# Altium footprint library Footprint-Lib-PhilsLab.PcbLib: 544 footprints (part 20 of 34)
Each footprint in its own frame and in the unit in brackets; x right, y up, seen from the top. Pads: shape width x height; smd on the part's side, far side on the other; paste and mask are expansions set on the pad; w line width, h text height; cw(c..) or ccw(c..) is an arc to the next point about the centre after c.
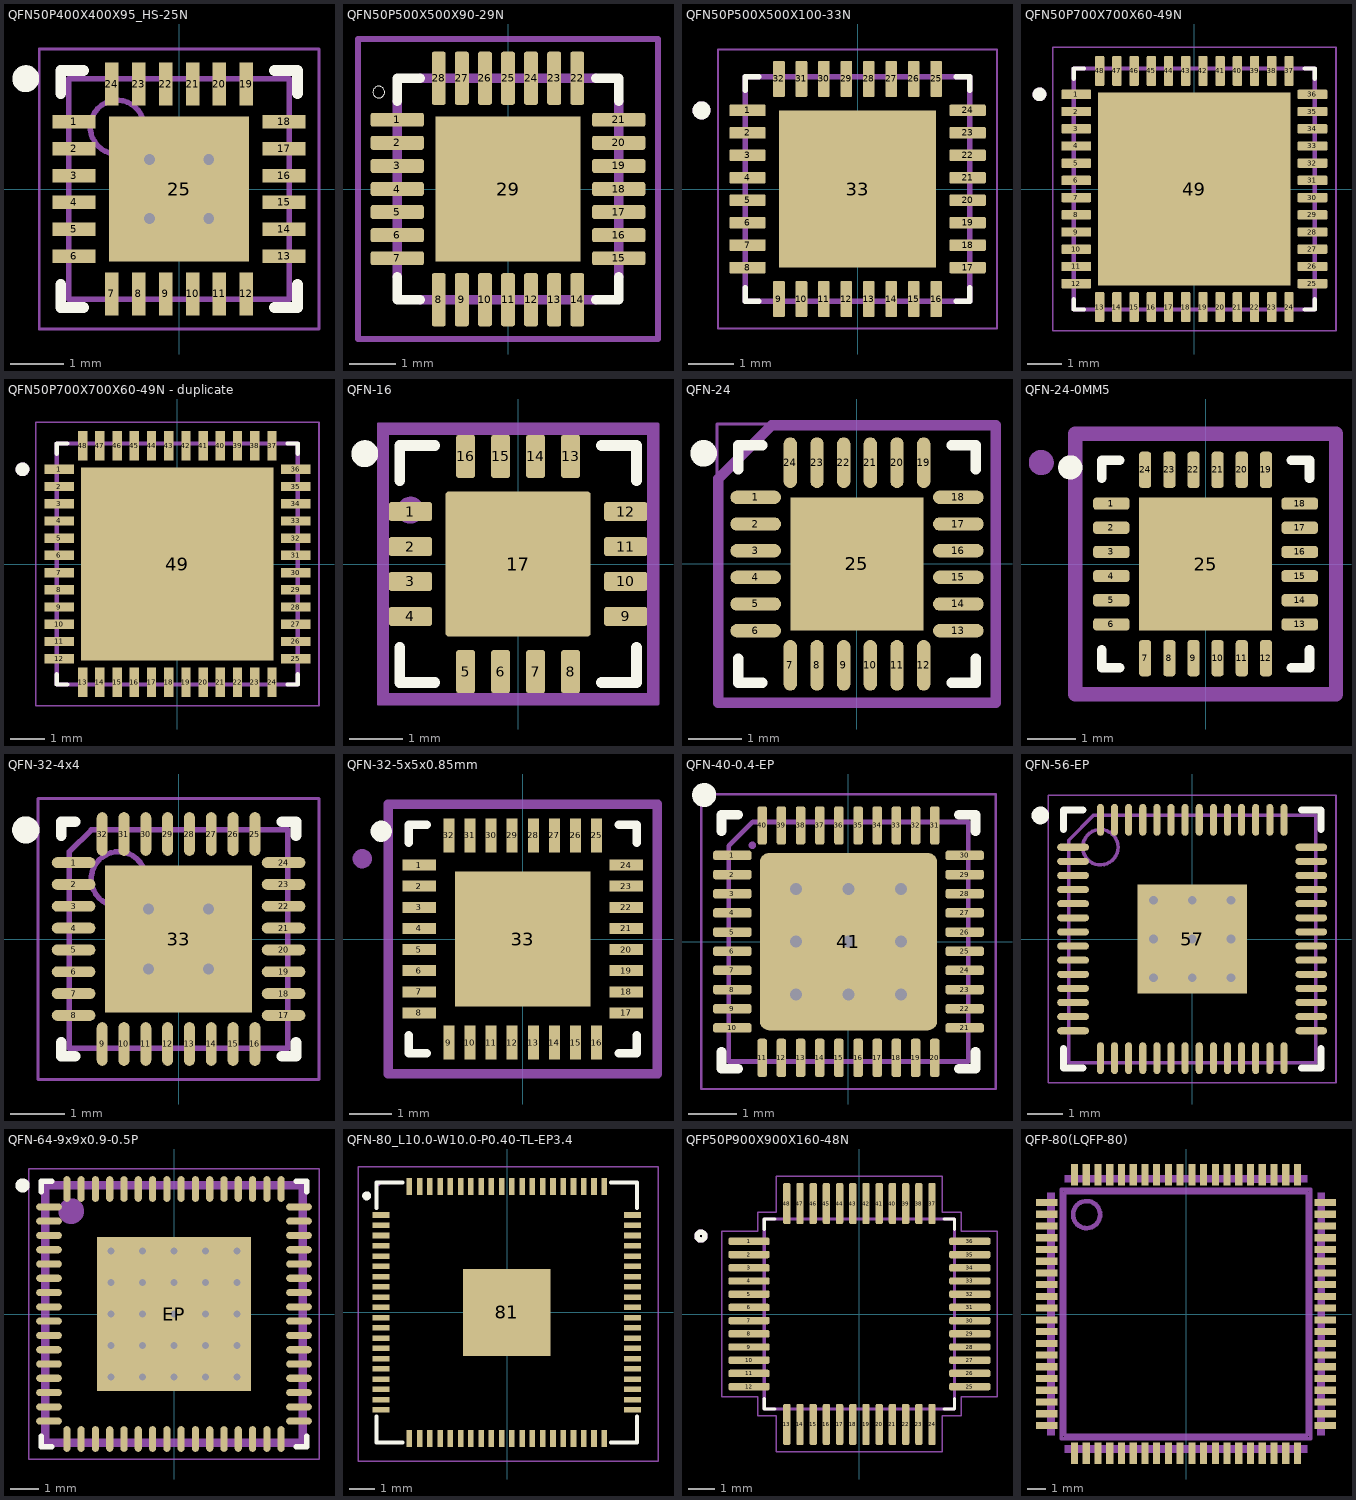
[diagram p19: the footprints below, top view; thin cyan lines are the x and y axes]

## QFN50P400X400X95_HS-25N [mm] "QFN, 24-Leads, Body 4.00x4.00mm, Pitch 0.50mm, Thermal Pad 2.60x2.70mm, IPC Medium Density"
height 0.95
pads (25):
  rect 0.8x0.25 smd mask+0.05: 1(-1.95,1.25) 2(-1.95,0.75) 3(-1.95,0.25) 4(-1.95,-0.25) 5(-1.95,-0.75) 6(-1.95,-1.25) 13(1.95,-1.25) 14(1.95,-0.75) 15(1.95,-0.25) 16(1.95,0.25) 17(1.95,0.75) 18(1.95,1.25)
  rect 0.25x0.8 smd mask+0.05: 7(-1.25,-1.95) 8(-0.75,-1.95) 9(-0.25,-1.95) 10(0.25,-1.95) 11(0.75,-1.95) 12(1.25,-1.95) 19(1.25,1.95) 20(0.75,1.95) 21(0.25,1.95) 22(-0.25,1.95) 23(-0.75,1.95) 24(-1.25,1.95)
  rect 2.6x2.7 smd mask+0.05: 25(0,0)
via 0.55,-0.55 diameter 0.5 hole 0.2
via -0.55,-0.55 diameter 0.5 hole 0.2
via 0.55,0.55 diameter 0.5 hole 0.2
via -0.55,0.55 diameter 0.5 hole 0.2
Top Overlay:
  circle w0.25: c-2.85,2.05 r0.125
  lines w0.2: -2.2,-1.775 -2.2,-2.2 -1.775,-2.2 ; -2.2,1.775 -2.2,2.2 -1.775,2.2 ; 1.775,-2.2 2.2,-2.2 2.2,-1.775 ; 1.775,2.2 2.2,2.2 2.2,1.775
Mechanical 13:
  circle w0.1: c-1.15,1.15 r0.5
  lines w0.1: -2.05,-2.05 2.05,-2.05 2.05,2.05 -2.05,2.05 -2.05,-2.05
  text "'.Designator'" at -5.84,-0.925 h1
Mechanical 15:
  lines w0.05: -2.6,-2.6 2.6,-2.6 2.6,2.6 -2.6,2.6 -2.6,-2.6
  lines w0.1: -0.5,0 0.5,0 ; 0,-0.5 0,0.5
3D body "ICM-20689.STEP": height 0.94, standoff -0.01, extent -2,-2 2,2

## QFN50P500X500X90-29N [mm]
pads (29):
  rrect30% 1.15x0.3 smd mask+0: 1(-2.4,1.5) 2(-2.4,1) 3(-2.4,0.5) 4(-2.4,0) 5(-2.4,-0.5) 6(-2.4,-1) 7(-2.4,-1.5) 15(2.4,-1.5) 16(2.4,-1) 17(2.4,-0.5) 18(2.4,0) 19(2.4,0.5) 20(2.4,1) 21(2.4,1.5)
  rrect30% 0.3x1.15 smd mask+0: 8(-1.5,-2.4) 9(-1,-2.4) 10(-0.5,-2.4) 11(0,-2.4) 12(0.5,-2.4) 13(1,-2.4) 14(1.5,-2.4) 22(1.5,2.4) 23(1,2.4) 24(0.5,2.4) 25(0,2.4) 26(-0.5,2.4) 27(-1,2.4) 28(-1.5,2.4)
  rect 3.15x3.15 smd paste-3: 29(0,0)
Top Overlay:
  circle w0: c-2.8,2.1 r0.127
  lines w0.203: -2.398,-1.902 -2.398,-2.398 -1.902,-2.398 ; -2.398,1.902 -2.398,2.398 -1.902,2.398 ; 1.902,-2.398 2.398,-2.398 2.398,-1.902 ; 1.902,2.398 2.398,2.398 2.398,1.902
Top Paste:
  region: 1,-1.002 -1.002,-1.002 -1.002,1 1,1
Top Solder:
  region: -1.775,-1.703 -3.03,-1.703 -3.03,-1.3 -1.775,-1.3
  region: -1.775,-1.201 -3.028,-1.201 -3.028,-0.8 -1.775,-0.8
  region: -1.775,-0.701 -3.029,-0.701 -3.029,-0.3 -1.775,-0.3
  region: -1.775,-0.2 -3.026,-0.2 -3.026,0.2 -1.775,0.2
  region: -1.775,0.3 -3.027,0.3 -3.027,0.7 -1.775,0.7
  region: -1.775,0.801 -3.028,0.801 -3.028,1.2 -1.775,1.2
  region: -1.775,1.3 -3.025,1.3 -3.025,1.7 -1.775,1.7
  region: 2.125,-2.605 0.877,-2.605 0.877,-2.2 2.125,-2.2
  region: 1.625,-2.602 0.375,-2.602 0.375,-2.2 1.625,-2.2
  region: 1.125,-2.602 -0.125,-2.602 -0.125,-2.2 1.125,-2.2
  region: 0.625,-2.603 -0.626,-2.603 -0.626,-2.2 0.625,-2.2
  region: 0.125,-2.605 -1.127,-2.605 -1.127,-2.2 0.125,-2.2
  region: -0.375,-2.605 -1.628,-2.605 -1.628,-2.2 -0.375,-2.2
  region: -0.875,-2.602 -2.126,-2.602 -2.126,-2.2 -0.875,-2.2
  region: 3.025,1.301 1.776,1.301 1.776,1.7 3.025,1.7
  region: 3.025,0.801 1.778,0.801 1.778,1.2 3.025,1.2
  region: 3.025,0.3 1.776,0.3 1.776,0.7 3.025,0.7
  region: 3.025,-0.2 1.777,-0.2 1.777,0.2 3.025,0.2
  region: 3.025,-0.701 1.778,-0.701 1.778,-0.3 3.025,-0.3
  region: 3.025,-1.2 1.775,-1.2 1.775,-0.8 3.025,-0.8
  region: 3.025,-1.7 1.775,-1.7 1.775,-1.3 3.025,-1.3
  region: 2.125,2.2 0.875,2.2 0.875,2.6 2.125,2.6
  region: 1.625,2.202 0.375,2.202 0.375,2.6 1.625,2.6
  region: 1.125,2.204 -0.125,2.204 -0.125,2.6 1.125,2.6
  region: 0.625,2.201 -0.625,2.201 -0.625,2.6 0.625,2.6
  region: 0.125,2.201 -1.125,2.201 -1.125,2.6 0.125,2.6
  region: -0.375,2.202 -1.626,2.202 -1.626,2.6 -0.375,2.6
  region: -0.875,2.201 -2.126,2.201 -2.126,2.6 -0.875,2.6
Mechanical 13:
  lines w0.203: -2.4,-1.9 -2.4,1.9 ; -1.9,-2.4 1.9,-2.4 ; -1.9,2.4 1.9,2.4 ; 2.4,-1.9 2.4,1.9
Mechanical 15:
  lines w0.127: -3.25,-3.25 3.25,-3.25 3.25,3.25 -3.25,3.25 -3.25,-3.25

## QFN50P500X500X100-33N [mm]
pads (33):
  rrect25% 0.81x0.26 smd: 1(-2.45,1.75) 2(-2.45,1.25) 3(-2.45,0.75) 4(-2.45,0.25) 5(-2.45,-0.25) 6(-2.45,-0.75) 7(-2.45,-1.25) 8(-2.45,-1.75) 17(2.45,-1.75) 18(2.45,-1.25) 19(2.45,-0.75) 20(2.45,-0.25) 21(2.45,0.25) 22(2.45,0.75) 23(2.45,1.25) 24(2.45,1.75)
  rrect25% 0.26x0.81 smd: 9(-1.75,-2.45) 10(-1.25,-2.45) 11(-0.75,-2.45) 12(-0.25,-2.45) 13(0.25,-2.45) 14(0.75,-2.45) 15(1.25,-2.45) 16(1.75,-2.45) 25(1.75,2.45) 26(1.25,2.45) 27(0.75,2.45) 28(0.25,2.45) 29(-0.25,2.45) 30(-0.75,2.45) 31(-1.25,2.45) 32(-1.75,2.45)
  rect 3.5x3.5 smd paste-0.64: 33(0,0)
Top Overlay:
  circle w0.2: c-3.475,1.75 r0.1
  lines w0.127: -2.5,-2.2 -2.5,-2.5 -2.2,-2.5 ; -2.5,2.2 -2.5,2.5 -2.2,2.5 ; 2.2,-2.5 2.5,-2.5 2.5,-2.2 ; 2.2,2.5 2.5,2.5 2.5,2.2
Mechanical 13:
  circle w0.2: c-3.475,1.75 r0.1
  lines w0.127: -2.5,-2.5 -2.5,2.5 2.5,2.5 2.5,-2.5 -2.5,-2.5
Mechanical 15:
  lines w0.05: -3.105,-3.105 -3.105,3.105 3.105,3.105 3.105,-3.105 -3.105,-3.105
3D body "step_temp.STEP": height 1, standoff 0, extent -2.5,-2.5 2.5,2.5

## QFN50P700X700X60-49N [mm]
pads (49):
  rrect25% 0.87x0.27 smd: 1(-3.43,2.75) 2(-3.43,2.25) 3(-3.43,1.75) 4(-3.43,1.25) 5(-3.43,0.75) 6(-3.43,0.25) 7(-3.43,-0.25) 8(-3.43,-0.75) 9(-3.43,-1.25) 10(-3.43,-1.75) 11(-3.43,-2.25) 12(-3.43,-2.75) 25(3.43,-2.75) 26(3.43,-2.25) 27(3.43,-1.75) 28(3.43,-1.25) 29(3.43,-0.75) 30(3.43,-0.25) 31(3.43,0.25) 32(3.43,0.75) 33(3.43,1.25) 34(3.43,1.75) 35(3.43,2.25) 36(3.43,2.75)
  rrect25% 0.27x0.87 smd: 13(-2.75,-3.43) 14(-2.25,-3.43) 15(-1.75,-3.43) 16(-1.25,-3.43) 17(-0.75,-3.43) 18(-0.25,-3.43) 19(0.25,-3.43) 20(0.75,-3.43) 21(1.25,-3.43) 22(1.75,-3.43) 23(2.25,-3.43) 24(2.75,-3.43) 37(2.75,3.43) 38(2.25,3.43) 39(1.75,3.43) 40(1.25,3.43) 41(0.75,3.43) 42(0.25,3.43) 43(-0.25,3.43) 44(-0.75,3.43) 45(-1.25,3.43) 46(-1.75,3.43) 47(-2.25,3.43) 48(-2.75,3.43)
  rect 5.6x5.6 smd paste-4: 49(0,0)
Top Overlay:
  circle w0.2: c-4.5,2.75 r0.1
  lines w0.127: -3.5,-3.205 -3.5,-3.5 -3.205,-3.5 ; -3.5,3.205 -3.5,3.5 -3.205,3.5 ; 3.205,-3.5 3.5,-3.5 3.5,-3.205 ; 3.205,3.5 3.5,3.5 3.5,3.205
Top Paste:
  region: -0.51,0.51 -2.29,0.51 -2.29,2.29 -0.51,2.29
  region: 2.29,0.51 0.51,0.51 0.51,2.29 2.29,2.29
  region: -0.51,-2.29 -2.29,-2.29 -2.29,-0.51 -0.51,-0.51
  region: 2.29,-2.29 0.51,-2.29 0.51,-0.51 2.29,-0.51
Mechanical 13:
  circle w0.2: c-4.5,2.75 r0.1
  lines w0.127: -3.5,-3.5 3.5,-3.5 3.5,3.5 -3.5,3.5 -3.5,-3.5
Mechanical 15:
  lines w0.05: -4.115,-4.115 4.115,-4.115 4.115,4.115 -4.115,4.115 -4.115,-4.115

## QFN50P700X700X60-49N - duplicate [mm]
height 0.6
pads (49):
  rect 0.86x0.27 smd mask+0.05: 1(-3.435,2.75) 2(-3.435,2.25) 3(-3.435,1.75) 4(-3.435,1.25) 5(-3.435,0.75) 6(-3.435,0.25) 7(-3.435,-0.25) 8(-3.435,-0.75) 9(-3.435,-1.25) 10(-3.435,-1.75) 11(-3.435,-2.25) 12(-3.435,-2.75) 25(3.435,-2.75) 26(3.435,-2.25) 27(3.435,-1.75) 28(3.435,-1.25) 29(3.435,-0.75) 30(3.435,-0.25) 31(3.435,0.25) 32(3.435,0.75) 33(3.435,1.25) 34(3.435,1.75) 35(3.435,2.25) 36(3.435,2.75)
  rect 0.27x0.86 smd mask+0.05: 13(-2.75,-3.435) 14(-2.25,-3.435) 15(-1.75,-3.435) 16(-1.25,-3.435) 17(-0.75,-3.435) 18(-0.25,-3.435) 19(0.25,-3.435) 20(0.75,-3.435) 21(1.25,-3.435) 22(1.75,-3.435) 23(2.25,-3.435) 24(2.75,-3.435) 37(2.75,3.435) 38(2.25,3.435) 39(1.75,3.435) 40(1.25,3.435) 41(0.75,3.435) 42(0.25,3.435) 43(-0.25,3.435) 44(-0.75,3.435) 45(-1.25,3.435) 46(-1.75,3.435) 47(-2.25,3.435) 48(-2.75,3.435)
  rect 5.6x5.6 smd paste-4 mask+0.05: 49(0,0)
Top Overlay:
  circle w0.2: c-4.5,2.75 r0.1
  lines w0.127: -3.5,-3.2 -3.5,-3.5 -3.2,-3.5 ; -3.5,3.2 -3.5,3.5 -3.2,3.5 ; 3.2,-3.5 3.5,-3.5 3.5,-3.2 ; 3.2,3.5 3.5,3.5 3.5,3.2
Top Paste:
  region: -0.515,0.515 -2.285,0.515 -2.285,2.285 -0.515,2.285
  region: 2.285,0.515 0.515,0.515 0.515,2.285 2.285,2.285
  region: -0.515,-2.285 -2.285,-2.285 -2.285,-0.515 -0.515,-0.515
  region: 2.285,-2.285 0.515,-2.285 0.515,-0.515 2.285,-0.515
Mechanical 13:
  circle w0.2: c-4.5,2.75 r0.1
  lines w0.127: -3.5,-3.5 3.5,-3.5 3.5,3.5 -3.5,3.5 -3.5,-3.5
Mechanical 15:
  lines w0.05: -4.115,-4.115 4.115,-4.115 4.115,4.115 -4.115,4.115 -4.115,-4.115
3D body "step_temp.STEP": height 0.6, standoff 0, extent -3.5,-3.5 3.5,3.5

## QFN-16 [mm]
height 1
pads (17):
  rrect25% 0.8x0.35 smd mask+0.07: 1(-2,0.975) 2(-2,0.325) 3(-2,-0.325) 4(-2,-0.975) 9(2,-0.975) 10(2,-0.325) 11(2,0.325) 12(2,0.975)
  rrect25% 0.35x0.8 smd mask+0.07: 5(-0.975,-2) 6(-0.325,-2) 7(0.325,-2) 8(0.975,-2) 13(0.975,2) 14(0.325,2) 15(-0.325,2) 16(-0.975,2)
  rrect5% 2.7x2.7 smd mask+0.07: 17(0,0)
Top Overlay:
  circle w0.25: c-2.85,2.05 r0.125
  lines w0.2: -2.2,-1.55 -2.2,-2.2 -1.55,-2.2 ; -2.2,1.55 -2.2,2.2 -1.55,2.2 ; 1.55,-2.2 2.2,-2.2 2.2,-1.55 ; 1.55,2.2 2.2,2.2 2.2,1.55
Mechanical 13:
  circle w0.25: c-2,1 r0.125
  lines w0.2: -2.5,-2.5 2.5,-2.5 2.5,2.5 -2.5,2.5 -2.5,-2.5
  text "'.Designator'" at -5.665,-0.417 h1
Mechanical 15:
  lines w0.05: -2.6,-2.6 2.6,-2.6 2.6,2.6 -2.6,2.6 -2.6,-2.6
  lines w0.1: -0.5,0 0.5,0 ; 0,-0.5 0,0.5
3D body "QFN-16.step": height 1, standoff 0, extent -2.13,-2.13 2.13,2.13

## QFN-24 [mm] "QFN, 24-Leads, Body 4.00x4.00mm, Pitch 0.50mm, Thermal Pad 2.50x2.50mm, IPC Medium Density"
height 1
pads (25):
  oval 0.95x0.25 smd mask+0.03: 1(-1.9,1.25) 2(-1.9,0.75) 3(-1.9,0.25) 4(-1.9,-0.25) 5(-1.9,-0.75) 6(-1.9,-1.25) 13(1.9,-1.25) 14(1.9,-0.75) 15(1.9,-0.25) 16(1.9,0.25) 17(1.9,0.75) 18(1.9,1.25)
  oval 0.25x0.95 smd mask+0.03: 7(-1.25,-1.9) 8(-0.75,-1.9) 9(-0.25,-1.9) 10(0.25,-1.9) 11(0.75,-1.9) 12(1.25,-1.9) 19(1.25,1.9) 20(0.75,1.9) 21(0.25,1.9) 22(-0.25,1.9) 23(-0.75,1.9) 24(-1.25,1.9)
  rect 2.5x2.5 smd mask+0.03: 25(0,0)
Top Overlay:
  circle w0.25: c-2.875,2.075 r0.125
  lines w0.2: -2.225,-1.775 -2.225,-2.225 -1.775,-2.225 ; -2.225,1.775 -2.225,2.225 -1.775,2.225 ; 1.775,-2.225 2.225,-2.225 2.225,-1.775 ; 1.775,2.225 2.225,2.225 2.225,1.775
Mechanical 13:
  lines w0.2: -2.6,-2.6 2.6,-2.6 2.6,2.6 -1.6,2.6 -2.6,1.6 -2.6,-2.6
  text "'.Designator'" at -6.315,-1.4 h1
Mechanical 15:
  lines w0.05: -2.625,-2.625 -2.625,2.625 2.625,2.625 2.625,-2.625 -2.625,-2.625
  lines w0.1: -0.5,0 0.5,0 ; 0,-0.5 0,0.5
3D body "QFN-24.step": height 1, standoff 0, extent -2.076,-2.076 2.076,2.076

## QFN-24-0MM5 [mm]
height 0.6
pads (25):
  rrect50% 0.75x0.25 smd mask+0.05: 1(-1.95,1.25) 2(-1.95,0.75) 3(-1.95,0.25) 4(-1.95,-0.25) 5(-1.95,-0.75) 6(-1.95,-1.25) 13(1.95,-1.25) 14(1.95,-0.75) 15(1.95,-0.25) 16(1.95,0.25) 17(1.95,0.75) 18(1.95,1.25)
  rrect50% 0.25x0.75 smd mask+0.05: 7(-1.25,-1.95) 8(-0.75,-1.95) 9(-0.25,-1.95) 10(0.25,-1.95) 11(0.75,-1.95) 12(1.25,-1.95) 19(1.25,1.95) 20(0.75,1.95) 21(0.25,1.95) 22(-0.25,1.95) 23(-0.75,1.95) 24(-1.25,1.95)
  rect 2.75x2.75 smd mask+0.3: 25(0,0)
Top Overlay:
  circle w0.25: c-2.8,2 r0.125
  lines w0.2: -2.15,-1.775 -2.15,-2.15 -1.775,-2.15 ; -2.15,1.775 -2.15,2.15 -1.775,2.15 ; 1.775,-2.15 2.15,-2.15 2.15,-1.775 ; 1.775,2.15 2.15,2.15 2.15,1.775
Mechanical 13:
  circle w0.3: c-3.4,2.1 r0.109
  lines w0.3: -2.7,-2.7 2.7,-2.7 2.7,2.7 -2.7,2.7 -2.7,-2.7
  text "'.Designator'" at -5.815,-0.9 h1
Mechanical 15:
  lines w0.05: -2.575,-2.575 2.575,-2.575 2.575,2.575 -2.575,2.575 -2.575,-2.575
  lines w0.1: -0.5,0 0.5,0 ; 0,-0.5 0,0.5
3D body "QFN-24-0MM5.step": height 0.6, standoff 0, extent -2.001,-2.001 2.001,2.001

## QFN-32-4x4 [mm] "QFN, 32-Leads, Body 4.00x4.00mm, Pitch 0.40mm, Thermal Pad 2.70x2.70mm, IPC Medium Density"
height 0.9
pads (33):
  oval 0.8x0.2 smd mask+0.05: 1(-1.925,1.4) 2(-1.925,1) 3(-1.925,0.6) 4(-1.925,0.2) 5(-1.925,-0.2) 6(-1.925,-0.6) 7(-1.925,-1) 8(-1.925,-1.4) 17(1.925,-1.4) 18(1.925,-1) 19(1.925,-0.6) 20(1.925,-0.2) 21(1.925,0.2) 22(1.925,0.6) 23(1.925,1) 24(1.925,1.4)
  oval 0.2x0.8 smd mask+0.05: 9(-1.4,-1.925) 10(-1,-1.925) 11(-0.6,-1.925) 12(-0.2,-1.925) 13(0.2,-1.925) 14(0.6,-1.925) 15(1,-1.925) 16(1.4,-1.925) 25(1.4,1.925) 26(1,1.925) 27(0.6,1.925) 28(0.2,1.925) 29(-0.2,1.925) 30(-0.6,1.925) 31(-1,1.925) 32(-1.4,1.925)
  rect 2.7x2.7 smd mask+0.05: 33(0,0)
via 0.55,-0.55 diameter 0.5 hole 0.2
via -0.55,-0.55 diameter 0.5 hole 0.2
via 0.55,0.55 diameter 0.5 hole 0.2
via -0.55,0.55 diameter 0.5 hole 0.2
Top Overlay:
  circle w0.25: c-2.8,2 r0.125
  lines w0.2: -2.15,-1.9 -2.15,-2.15 -1.9,-2.15 ; -2.15,1.9 -2.15,2.15 -1.9,2.15 ; 1.9,-2.15 2.15,-2.15 2.15,-1.9 ; 1.9,2.15 2.15,2.15 2.15,1.9
Mechanical 13:
  circle w0.1: c-1.1,1.1 r0.5
  lines w0.1: -2,-2 -2,1.6 -1.6,2 2,2 2,-2 -2,-2
  text "'.Designator'" at -7.231,-1.087 h1.25
Mechanical 15:
  lines w0.05: -2.575,-2.575 2.575,-2.575 2.575,2.575 -2.575,2.575 -2.575,-2.575
  lines w0.1: -0.5,0 0.5,0 ; 0,-0.5 0,0.5
3D body "QFN40P400X400X90_HS-33N.step": height 0.9, standoff 0, extent -2.02,-2.02 2.02,2.02

## QFN-32-5x5x0.85mm [mm]
height 1
pads (33):
  rect 0.8x0.26 smd mask+0.125: 1(-2.45,1.75) 2(-2.45,1.25) 3(-2.45,0.75) 4(-2.45,0.25) 5(-2.45,-0.25) 6(-2.45,-0.75) 7(-2.45,-1.25) 8(-2.45,-1.75) 17(2.45,-1.75) 18(2.45,-1.25) 19(2.45,-0.75) 20(2.45,-0.25) 21(2.45,0.25) 22(2.45,0.75) 23(2.45,1.25) 24(2.45,1.75)
  rect 0.26x0.8 smd mask+0.125: 9(-1.75,-2.45) 10(-1.25,-2.45) 11(-0.75,-2.45) 12(-0.25,-2.45) 13(0.25,-2.45) 14(0.75,-2.45) 15(1.25,-2.45) 16(1.75,-2.45) 25(1.75,2.45) 26(1.25,2.45) 27(0.75,2.45) 28(0.25,2.45) 29(-0.25,2.45) 30(-0.75,2.45) 31(-1.25,2.45) 32(-1.75,2.45)
  rect 3.2x3.2 smd: 33(0,0)
Top Overlay:
  circle w0.25: c-3.35,2.55 r0.125
  lines w0.2: -2.7,-2.275 -2.7,-2.7 -2.275,-2.7 ; -2.7,2.275 -2.7,2.7 -2.275,2.7 ; 2.275,-2.7 2.7,-2.7 2.7,-2.275 ; 2.275,2.7 2.7,2.7 2.7,2.275
Mechanical 13:
  circle w0.254: c-3.8,1.9 r0.1
  lines w0.2: -3.2,-3.2 3.2,-3.2 3.2,3.2 -3.2,3.2 -3.2,-3.2
  text "'.Designator'" at -5.665,-0.417 h1
Mechanical 15:
  lines w0.05: -3.1,-3.1 3.1,-3.1 3.1,3.1 -3.1,3.1 -3.1,-3.1
  lines w0.1: -0.5,0 0.5,0 ; 0,-0.5 0,0.5
3D body "QFN-32-5x5x0.85mm.step": height 1, standoff 0, extent -2.551,-2.551 2.551,2.551

## QFN-40-0.4-EP [mm] "QFN 40 Pads 0.4mm Pitch Thermal Pad"
height 0.9
pads (41):
  rrect50% 0.8x0.2 smd mask+0.15: 1(-2.425,1.8) 2(-2.425,1.4) 3(-2.425,1) 4(-2.425,0.6) 5(-2.425,0.2) 6(-2.425,-0.2) 7(-2.425,-0.6) 8(-2.425,-1) 9(-2.425,-1.4) 10(-2.425,-1.8) 21(2.425,-1.8) 22(2.425,-1.4) 23(2.425,-1) 24(2.425,-0.6) 25(2.425,-0.2) 26(2.425,0.2) 27(2.425,0.6) 28(2.425,1) 29(2.425,1.4) 30(2.425,1.8)
  rrect50% 0.2x0.8 smd mask+0.15: 11(-1.8,-2.425) 12(-1.4,-2.425) 13(-1,-2.425) 14(-0.6,-2.425) 15(-0.2,-2.425) 16(0.2,-2.425) 17(0.6,-2.425) 18(1,-2.425) 19(1.4,-2.425) 20(1.8,-2.425) 31(1.8,2.425) 32(1.4,2.425) 33(1,2.425) 34(0.6,2.425) 35(0.2,2.425) 36(-0.2,2.425) 37(-0.6,2.425) 38(-1,2.425) 39(-1.4,2.425) 40(-1.8,2.425)
  rrect10% 3.7x3.7 smd mask+0.15: 41(0,0)
via 1.1,-1.1 diameter 0.6 hole 0.25
via 0,-1.1 diameter 0.6 hole 0.25
via -1.1,-1.1 diameter 0.6 hole 0.25
via 1.1,0 diameter 0.6 hole 0.25
via 0,0 diameter 0.6 hole 0.25
via -1.1,0 diameter 0.6 hole 0.25
via 1.1,1.1 diameter 0.6 hole 0.25
via 0,1.1 diameter 0.6 hole 0.25
via -1.1,1.1 diameter 0.6 hole 0.25
Top Overlay:
  circle w0.25: c-3.012,3.061 r0.125
  lines w0.2: -2.65,-2.3 -2.65,-2.65 -2.3,-2.65 ; -2.65,2.3 -2.65,2.65 -2.3,2.65 ; 2.3,-2.65 2.65,-2.65 2.65,-2.3 ; 2.3,2.65 2.65,2.65 2.65,2.3
Mechanical 13:
  circle w0.1: c-2.007,2.012 r0.028
  lines w0.1: -2.5,-2.5 -2.5,2 -2,2.5 2.5,2.5 2.5,-2.5 -2.5,-2.5
  text "'.Designator'" at -5.815,-0.9 h1
Mechanical 15:
  lines w0.05: -3.075,-3.075 3.075,-3.075 3.075,3.075 -3.075,3.075 -3.075,-3.075
  lines w0.1: -0.5,0 0.5,0 ; 0,-0.5 0,0.5
3D body "QFN-40-0.4-EP.step": height 0.9, standoff 0, extent -2.501,-2.501 2.501,2.501

## QFN-56-EP [mm]
height 0.9
pads (57):
  oval 0.9x0.2 smd mask+0.15: 1(-3.375,2.6) 2(-3.375,2.2) 3(-3.375,1.8) 4(-3.375,1.4) 5(-3.375,1) 6(-3.375,0.6) 7(-3.375,0.2) 8(-3.375,-0.2) 9(-3.375,-0.6) 10(-3.375,-1) 11(-3.375,-1.4) 12(-3.375,-1.8) 13(-3.375,-2.2) 14(-3.375,-2.6) 29(3.375,-2.6) 30(3.375,-2.2) 31(3.375,-1.8) 32(3.375,-1.4) 33(3.375,-1) 34(3.375,-0.6) 35(3.375,-0.2) 36(3.375,0.2) 37(3.375,0.6) 38(3.375,1) 39(3.375,1.4) 40(3.375,1.8) 41(3.375,2.2) 42(3.375,2.6)
  oval 0.2x0.9 smd mask+0.15: 15(-2.6,-3.375) 16(-2.2,-3.375) 17(-1.8,-3.375) 18(-1.4,-3.375) 19(-1,-3.375) 20(-0.6,-3.375) 21(-0.2,-3.375) 22(0.2,-3.375) 23(0.6,-3.375) 24(1,-3.375) 25(1.4,-3.375) 26(1.8,-3.375) 27(2.2,-3.375) 28(2.6,-3.375) 43(2.6,3.375) 44(2.2,3.375) 45(1.8,3.375) 46(1.4,3.375) 47(1,3.375) 48(0.6,3.375) 49(0.2,3.375) 50(-0.2,3.375) 51(-0.6,3.375) 52(-1,3.375) 53(-1.4,3.375) 54(-1.8,3.375) 55(-2.2,3.375) 56(-2.6,3.375)
  rect 3.1x3.1 smd: 57(0,0)
via -1.1,1.1 diameter 0.6 hole 0.25
via 0,1.1 diameter 0.6 hole 0.25
via 1.1,1.1 diameter 0.6 hole 0.25
via -1.1,0 diameter 0.6 hole 0.25
via 0,0 diameter 0.6 hole 0.25
via 1.1,0 diameter 0.6 hole 0.25
via -1.1,-1.1 diameter 0.6 hole 0.25
via 0,-1.1 diameter 0.6 hole 0.25
via 1.1,-1.1 diameter 0.6 hole 0.25
Top Overlay:
  circle w0.25: c-4.3,3.5 r0.125
  lines w0.2: -3.65,-3.1 -3.65,-3.65 -3.1,-3.65 ; -3.65,3.1 -3.65,3.65 -3.1,3.65 ; 3.1,-3.65 3.65,-3.65 3.65,-3.1 ; 3.1,3.65 3.65,3.65 3.65,3.1
Mechanical 13:
  circle w0.1: c-2.6,2.6 r0.5
  lines w0.1: -3.5,-3.5 -3.5,2.8 -2.8,3.5 3.5,3.5 3.5,-3.5 -3.5,-3.5
  text "'.Designator'" at -6.315,-1.4 h1
Mechanical 15:
  lines w0.05: -4.075,-4.075 -4.075,4.075 4.075,4.075 4.075,-4.075 -4.075,-4.075
  lines w0.1: -0.5,0 0.5,0 ; 0,-0.5 0,0.5
3D body "RP2040.STEP": height 1.01, standoff 0.01, extent -3.51,-3.51 3.51,3.51

## QFN-64-9x9x0.9-0.5P [mm] "QFN, 64-Leads, Body 9.00x9.00mm, Pitch 0.50mm, Thermal Pad 5.40x5.40mm, IPC Medium Density"
height 1
pads (65):
  oval 0.9x0.25 smd mask+0.05: 1(-4.375,3.75) 2(-4.375,3.25) 3(-4.375,2.75) 4(-4.375,2.25) 5(-4.375,1.75) 6(-4.375,1.25) 7(-4.375,0.75) 8(-4.375,0.25) 9(-4.375,-0.25) 10(-4.375,-0.75) 11(-4.375,-1.25) 12(-4.375,-1.75) 13(-4.375,-2.25) 14(-4.375,-2.75) 15(-4.375,-3.25) 16(-4.375,-3.75) 33(4.375,-3.75) 34(4.375,-3.25) 35(4.375,-2.75) 36(4.375,-2.25) 37(4.375,-1.75) 38(4.375,-1.25) 39(4.375,-0.75) 40(4.375,-0.25) 41(4.375,0.25) 42(4.375,0.75) 43(4.375,1.25) 44(4.375,1.75) 45(4.375,2.25) 46(4.375,2.75) 47(4.375,3.25) 48(4.375,3.75)
  oval 0.25x0.9 smd mask+0.05: 17(-3.75,-4.375) 18(-3.25,-4.375) 19(-2.75,-4.375) 20(-2.25,-4.375) 21(-1.75,-4.375) 22(-1.25,-4.375) 23(-0.75,-4.375) 24(-0.25,-4.375) 25(0.25,-4.375) 26(0.75,-4.375) 27(1.25,-4.375) 28(1.75,-4.375) 29(2.25,-4.375) 30(2.75,-4.375) 31(3.25,-4.375) 32(3.75,-4.375) 49(3.75,4.375) 50(3.25,4.375) 51(2.75,4.375) 52(2.25,4.375) 53(1.75,4.375) 54(1.25,4.375) 55(0.75,4.375) 56(0.25,4.375) 57(-0.25,4.375) 58(-0.75,4.375) 59(-1.25,4.375) 60(-1.75,4.375) 61(-2.25,4.375) 62(-2.75,4.375) 63(-3.25,4.375) 64(-3.75,4.375)
  rect 5.4x5.4 smd: EP(0,0)
via 2.2,-2.2 diameter 0.6 hole 0.25
via 1.1,-2.2 diameter 0.6 hole 0.25
via 0,-2.2 diameter 0.6 hole 0.25
via -1.1,-2.2 diameter 0.6 hole 0.25
via -2.2,-2.2 diameter 0.6 hole 0.25
via 2.2,-1.1 diameter 0.6 hole 0.25
via 1.1,-1.1 diameter 0.6 hole 0.25
via 0,-1.1 diameter 0.6 hole 0.25
via -1.1,-1.1 diameter 0.6 hole 0.25
via -2.2,-1.1 diameter 0.6 hole 0.25
via 2.2,0 diameter 0.6 hole 0.25
via 1.1,0 diameter 0.6 hole 0.25
via 0,0 diameter 0.6 hole 0.25
via -1.1,0 diameter 0.6 hole 0.25
via -2.2,0 diameter 0.6 hole 0.25
via 2.2,1.1 diameter 0.6 hole 0.25
via 1.1,1.1 diameter 0.6 hole 0.25
via 0,1.1 diameter 0.6 hole 0.25
via -1.1,1.1 diameter 0.6 hole 0.25
via -2.2,1.1 diameter 0.6 hole 0.25
via 2.2,2.2 diameter 0.6 hole 0.25
via 1.1,2.2 diameter 0.6 hole 0.25
via 0,2.2 diameter 0.6 hole 0.25
via -1.1,2.2 diameter 0.6 hole 0.25
via -2.2,2.2 diameter 0.6 hole 0.25
Top Overlay:
  circle w0.25: c-5.3,4.5 r0.125
  lines w0.2: -4.65,-4.275 -4.65,-4.65 -4.275,-4.65 ; -4.65,4.275 -4.65,4.65 -4.275,4.65 ; 4.275,-4.65 4.65,-4.65 4.65,-4.275 ; 4.275,4.65 4.65,4.65 4.65,4.275
Mechanical 13:
  circle w0.5: c-3.6,3.6 r0.2
  lines w0.3: -4.5,-4.5 4.5,-4.5 4.5,4.5 -4.5,4.5 -4.5,-4.5
  text "'.Designator'" at -5.665,-0.417 h1
Mechanical 15:
  lines w0.05: -5.075,-5.075 5.075,-5.075 5.075,5.075 -5.075,5.075 -5.075,-5.075
  lines w0.1: -0.5,0 0.5,0 ; 0,-0.5 0,0.5
3D body "QFN-64-9x9x0.9-0.5P.step": height 1, standoff 0, extent -4.501,-4.501 4.501,4.501

## QFN-80_L10.0-W10.0-P0.40-TL-EP3.4 [mm] "RP2350B Footprint"
pads (81):
  rect 0.665x0.22 smd: 1(-4.925,3.789) 2(-4.925,3.389) 3(-4.925,2.989) 4(-4.925,2.589) 5(-4.925,2.189) 6(-4.925,1.789) 7(-4.925,1.389) 8(-4.925,0.989) 9(-4.925,0.589) 10(-4.925,0.189) 11(-4.925,-0.211) 12(-4.925,-0.611) 13(-4.925,-1.011) 14(-4.925,-1.411) 15(-4.925,-1.811) 16(-4.925,-2.211) 17(-4.925,-2.611) 18(-4.925,-3.011) 19(-4.925,-3.411) 20(-4.925,-3.811) 41(4.89,-3.811) 42(4.89,-3.411) 43(4.89,-3.011) 44(4.89,-2.611) 45(4.89,-2.211) 46(4.89,-1.811) 47(4.89,-1.411) 48(4.89,-1.011) 49(4.89,-0.611) 50(4.89,-0.211) 51(4.89,0.189) 52(4.89,0.589) 53(4.89,0.989) 54(4.89,1.389) 55(4.89,1.789) 56(4.89,2.189) 57(4.89,2.589) 58(4.89,2.989) 59(4.89,3.389) 60(4.89,3.789)
  rect 0.22x0.665 smd: 21(-3.818,-4.919) 22(-3.417,-4.919) 23(-3.017,-4.919) 24(-2.617,-4.919) 25(-2.217,-4.919) 26(-1.818,-4.919) 27(-1.417,-4.919) 28(-1.017,-4.919) 29(-0.617,-4.919) 30(-0.217,-4.919) 31(0.182,-4.919) 32(0.583,-4.919) 33(0.983,-4.919) 34(1.383,-4.919) 35(1.783,-4.919) 36(2.182,-4.919) 37(2.583,-4.919) 38(2.983,-4.919) 39(3.383,-4.919) 40(3.783,-4.919) 61(3.783,4.897) 62(3.383,4.897) 63(2.983,4.897) 64(2.583,4.897) 65(2.182,4.897) 66(1.783,4.897) 67(1.383,4.897) 68(0.983,4.897) 69(0.583,4.897) 70(0.182,4.897) 71(-0.217,4.897) 72(-0.617,4.897) 73(-1.017,4.897) 74(-1.417,4.897) 75(-1.818,4.897) 76(-2.217,4.897) 77(-2.617,4.897) 78(-3.017,4.897) 79(-3.417,4.897) 80(-3.818,4.897)
  rect 3.4x3.4 smd: 81(-0.017,-0.011)
Top Overlay:
  circle w0.3: c-5.48,4.54 r0.025
  lines w0.152: -5.094,-4.075 -5.094,-5.087 -4.082,-5.087 ; -5.094,4.053 -5.094,5.065 -4.082,5.065 ; 4.047,-5.087 5.059,-5.087 5.059,-4.075 ; 4.047,5.065 5.059,5.065 5.059,4.053
Mechanical 15:
  region: -4.957,4.989 -4.958,5.013 -4.993,5.048 -5.042,5.048 -5.077,5.013 -5.077,4.989 -5.077,4.965 -5.042,4.93 -4.993,4.93 -4.958,4.965
  lines w0.051: -5.82,-5.81 5.88,-5.81 5.88,5.67 -5.82,5.67 -5.82,-5.81
3D body "RP2350B.stp": height 0.96, standoff 0, extent -5.07,-5.05 5.03,5.05

## QFP50P900X900X160-48N [mm]
pads (48):
  rrect50% 1.56x0.28 smd: 1(-4.18,2.75) 2(-4.18,2.25) 3(-4.18,1.75) 4(-4.18,1.25) 5(-4.18,0.75) 6(-4.18,0.25) 7(-4.18,-0.25) 8(-4.18,-0.75) 9(-4.18,-1.25) 10(-4.18,-1.75) 11(-4.18,-2.25) 12(-4.18,-2.75) 25(4.18,-2.75) 26(4.18,-2.25) 27(4.18,-1.75) 28(4.18,-1.25) 29(4.18,-0.75) 30(4.18,-0.25) 31(4.18,0.25) 32(4.18,0.75) 33(4.18,1.25) 34(4.18,1.75) 35(4.18,2.25) 36(4.18,2.75)
  rrect50% 0.28x1.56 smd: 13(-2.75,-4.18) 14(-2.25,-4.18) 15(-1.75,-4.18) 16(-1.25,-4.18) 17(-0.75,-4.18) 18(-0.25,-4.18) 19(0.25,-4.18) 20(0.75,-4.18) 21(1.25,-4.18) 22(1.75,-4.18) 23(2.25,-4.18) 24(2.75,-4.18) 37(2.75,4.18) 38(2.25,4.18) 39(1.75,4.18) 40(1.25,4.18) 41(0.75,4.18) 42(0.25,4.18) 43(-0.25,4.18) 44(-0.75,4.18) 45(-1.25,4.18) 46(-1.75,4.18) 47(-2.25,4.18) 48(-2.75,4.18)
Top Overlay:
  circle w0.2: c-6,2.95 r0.15
  lines w0.127: -3.6,-3.21 -3.6,-3.6 -3.21,-3.6 ; -3.6,3.21 -3.6,3.6 -3.21,3.6 ; 3.21,-3.6 3.6,-3.6 3.6,-3.21 ; 3.21,3.6 3.6,3.6 3.6,3.21
Mechanical 13:
  circle w0.2: c-6,2.95 r0.15
  lines w0.127: -3.6,-3.6 -3.6,3.6 3.6,3.6 3.6,-3.6 -3.6,-3.6
Mechanical 15:
  lines w0.05: -5.21,-3.14 -5.21,3.14 -3.85,3.14 -3.85,3.85 -3.14,3.85 -3.14,5.21 3.14,5.21 3.14,3.85 3.85,3.85 3.85,3.14 5.21,3.14 5.21,-3.14 3.85,-3.14 3.85,-3.85 3.14,-3.85 3.14,-5.21 -3.14,-5.21 -3.14,-3.85 -3.85,-3.85 -3.85,-3.14 -5.21,-3.14
3D body "step_temp.STEP": height 1.6, standoff 0, extent -4.5,-4.5 4.5,4.5

## QFP-80(LQFP-80) [mm]
pads (80):
  rect 1.2x0.4 smd: NRST/PA1(-7.7,2.925) PA0(-7.7,3.575) PA2(-7.7,2.275) PA3(-7.7,1.625) PA4(-7.7,0.975) PA5(-7.7,0.325) PA6(-7.7,-0.325) PA7(-7.7,-0.975) PB2(7.7,-6.175) PB3(7.7,-5.525) PB4(7.7,-4.875) PB5(7.7,-4.225) PB6(7.7,-3.575) PB7(7.7,-2.925) PD4(7.7,4.225) PD5(7.7,4.875) PD6(7.7,5.525) PD7(7.7,6.175) PF0(7.7,-0.975) PF1(7.7,-0.325) PF2(7.7,0.325) PF3(7.7,0.975) PF4(7.7,1.625) PF5(7.7,2.275) PF6(7.7,2.925) PF7(7.7,3.575) PG0(-7.7,-4.875) PG1(-7.7,-5.525) PG2(-7.7,-6.175) PH0(-7.7,6.175) PH1(-7.7,5.525) PH2(-7.7,4.875) PH3(-7.7,4.225) VDD1(-7.7,-2.925) VDD4(7.7,-2.275) VDDA(-7.7,-3.575) VREF+(-7.7,-4.225) VSS1(-7.7,-2.275) VSS4(7.7,-1.625) VSSA/VREF-(-7.7,-1.625)
  rect 0.4x1.2 smd: P10(-4.225,7.7) P11(-4.875,7.7) P12(-5.525,7.7) P13(-6.175,7.7) PB0(5.525,-7.7) PB1(6.175,-7.7) PC0(3.575,7.7) PC1(2.925,7.7) PC2(0.975,7.7) PC3(0.325,7.7) PC4(-0.325,7.7) PC5(-0.975,7.7) PC6(-1.625,7.7) PC7(-2.275,7.7) PD0(-0.975,-7.7) PD1(-0.325,-7.7) PD2(0.325,-7.7) PD3(0.975,-7.7) PE0(-4.875,-7.7) PE1(-4.225,-7.7) PE2(-3.575,-7.7) PE3(-2.925,-7.7) PE4(-2.275,-7.7) PE5(-1.625,-7.7) PE6(-2.925,7.7) PE7(-3.575,7.7) PG3(-6.175,-7.7) PG4(6.175,7.7) PG5(5.525,7.7) PG6(4.875,7.7) PG7(4.225,7.7) PH4(1.625,-7.7) PH5(2.275,-7.7) PH6(2.925,-7.7) PH7(3.575,-7.7) VDD2(2.275,7.7) VDD3(4.225,-7.7) VLCD(-5.525,-7.7) VSS2(1.625,7.7) VSS3(4.875,-7.7)
Mechanical 13:
  drawing of 89 lines, arcs and shapes, not listed
  text "STM8L152M8T6" at -6.35,10.16 h1.27
3D body "STM8L152M8T6--3DModel-STEP-56544.STEP": height 1.6, standoff 0, extent -8,-8 8,8